# EAGLE library part TPS26600 (library Sirokko-parts)
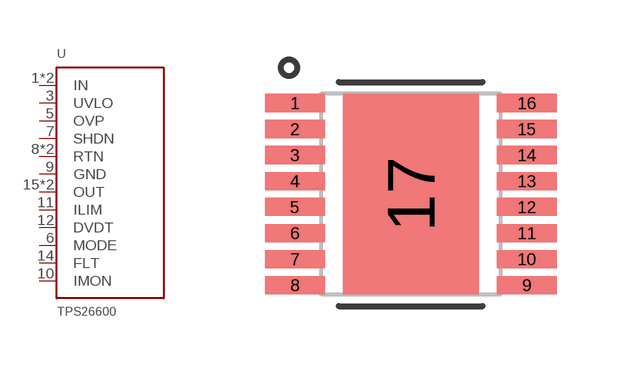
[diagram p1: symbol with the pads of TPS26600_PWP; footprint TPS26600_PWP]

Designator prefix U

## TPS26600 (DATASHEET: https://www.ti.com/lit/ds/symlink/tps2660.pdf; MPN: TPS26600PWP)  [TPS26600_PWP]
1  IN  pas
2  IN  pas
3  UVLO  pas
5  OVP  pas
6  MODE  pas
7  SHDN  pas
8  RTN  pas
9  GND  pas
10  IMON  pas
11  ILIM  pas
12  DVDT  pas
14  FLT  pas
15  OUT  pas
16  OUT  pas
17  RTN  pas

## Footprint TPS26600_PWP (pad centres in mm)
smd 1.5 x 0.45: 1 -2.9,2.275; 2 -2.9,1.625; 3 -2.9,0.975; 4 -2.9,0.325; 5 -2.9,-0.325; 6 -2.9,-0.975; 7 -2.9,-1.625; 8 -2.9,-2.275; 9 2.9,-2.275; 10 2.9,-1.625; 11 2.9,-0.975; 12 2.9,-0.325; 13 2.9,0.325; 14 2.9,0.975; 15 2.9,1.625; 16 2.9,2.275
smd 3.4 x 5: 17 0,0